# Altium footprint library FootPrintLib_1.PcbLib: 498 footprints (part 31 of 35)
Each footprint in its own frame and in the unit in brackets; x right, y up, seen from the top. Pads: shape width x height; smd on the part's side, far side on the other; paste and mask are expansions set on the pad; w line width, h text height; cw(c..) or ccw(c..) is an arc to the next point about the centre after c.
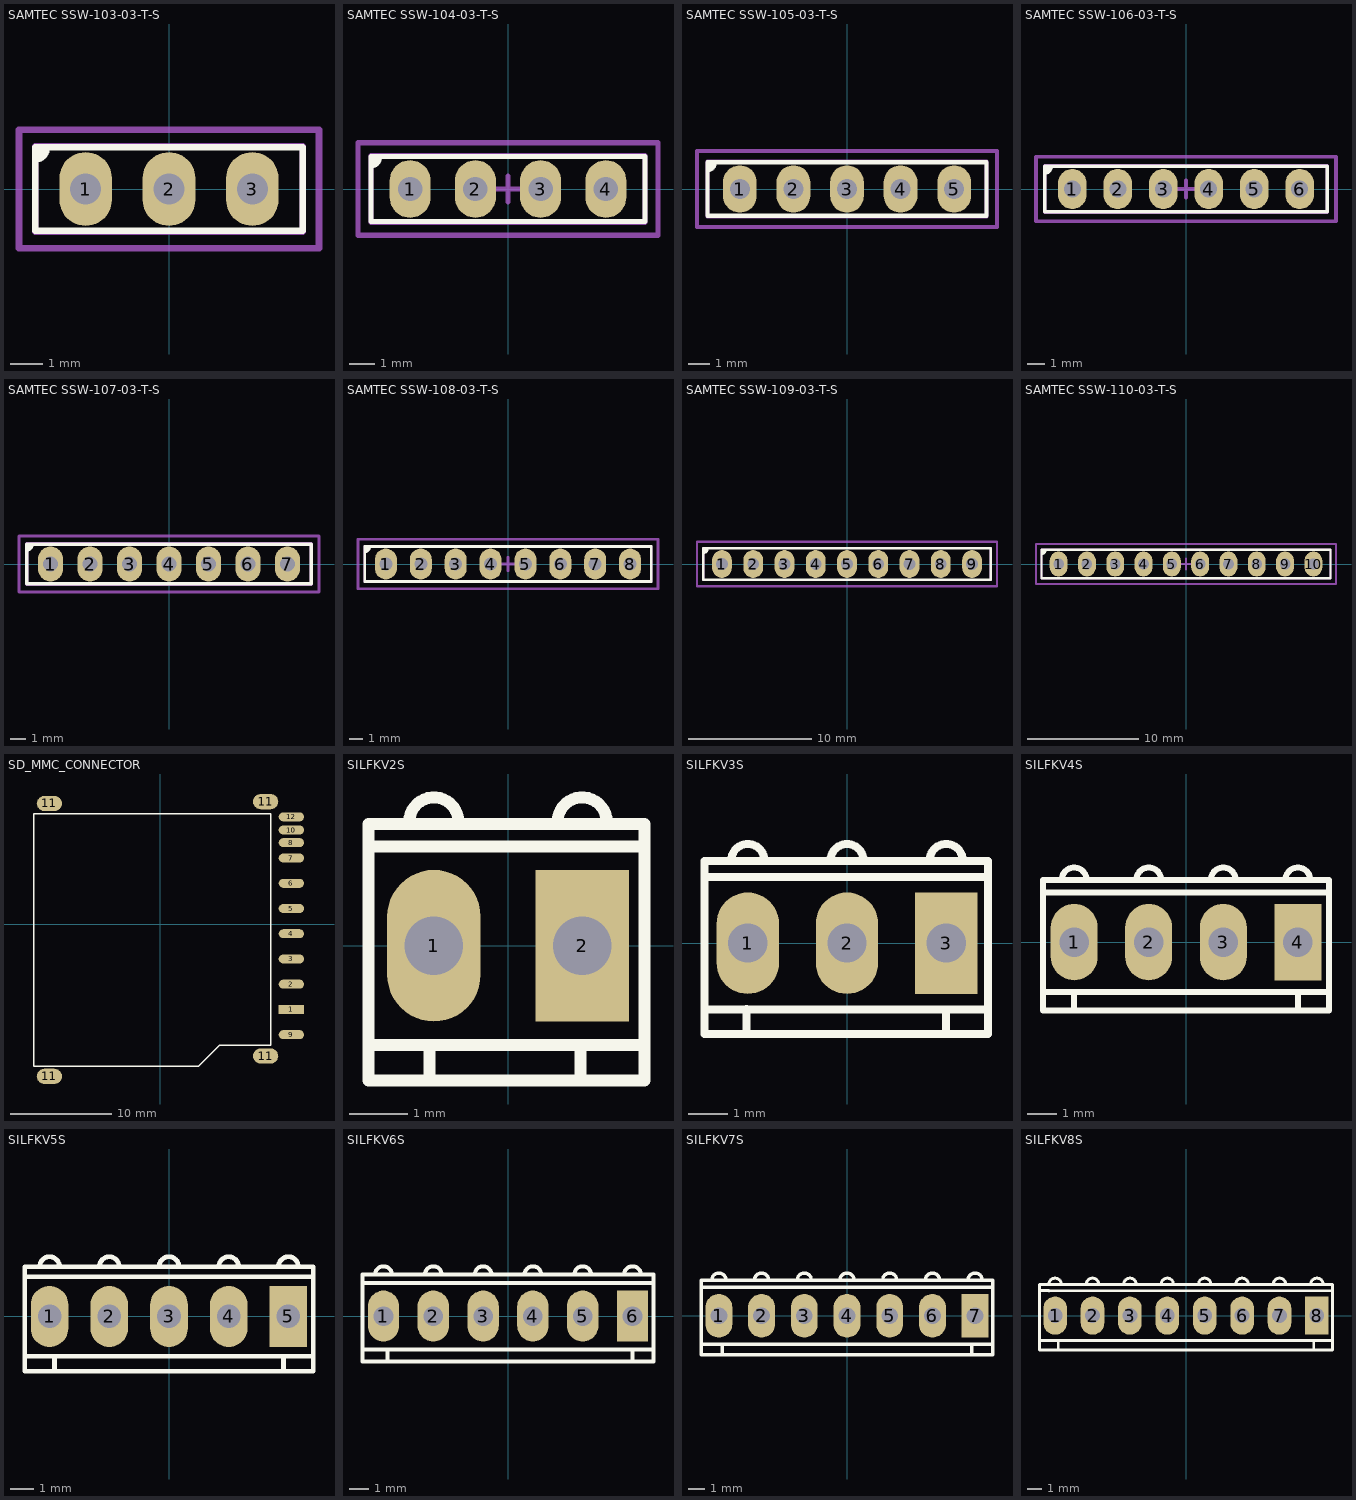
[diagram p30: the footprints below, top view; thin cyan lines are the x and y axes]

## SAMTEC SSW-103-03-T-S [mm]
height 8.51
pads (3):
  oval 1.6x2.25 hole 0.95: 1(-2.54,0) 2(0,0) 3(2.54,0)
Top Overlay:
  region: -4.07,1.27 -3.73,1.27 -3.73,1.1 -3.93,0.9 -4.07,0.9
  lines w0.2: -4.07,0.9 ccw(c-4.07,1.24) -3.73,1.24 -3.73,1.27 ; -4.07,-1.27 4.07,-1.27 4.07,1.27 -4.07,1.27 -4.07,-1.27
Mechanical 13:
  lines w0.2: -4.07,-1.3 -4.07,1.3 4.07,1.3 4.07,-1.3 -4.07,-1.3
Mechanical 15:
  lines w0.2: -0.5,0 0.5,0 ; 0,-0.5 0,0.5 ; -4.57,-1.8 4.57,-1.8 4.57,1.8 -4.57,1.8 -4.57,-1.8
3D body "Samtec-SSW-103-03-T-S.STEP": height 8.51, standoff -10.01, extent -4.064,-1.206 4.064,1.207

## SAMTEC SSW-104-03-T-S [mm]
height 8.51
pads (4):
  oval 1.6x2.25 hole 0.95: 1(-3.81,0) 2(-1.27,0) 3(1.27,0) 4(3.81,0)
Top Overlay:
  region: -5.34,1.27 -5,1.27 -5,1.1 -5.2,0.9 -5.34,0.9
  lines w0.2: -5.34,0.9 ccw(c-5.34,1.24) -5,1.24 -5,1.27 ; -5.34,-1.27 5.34,-1.27 5.34,1.27 -5.34,1.27 -5.34,-1.27
Mechanical 13:
  lines w0.2: -5.34,-1.3 -5.34,1.3 5.34,1.3 5.34,-1.3 -5.34,-1.3
Mechanical 15:
  lines w0.2: -0.5,0 0.5,0 ; 0,-0.5 0,0.5 ; -5.84,-1.8 5.84,-1.8 5.84,1.8 -5.84,1.8 -5.84,-1.8
3D body "Samtec-SSW-104-03-T-S.STEP": height 8.51, standoff -10.01, extent -5.334,-1.206 5.334,1.207

## SAMTEC SSW-105-03-T-S [mm]
height 8.51
pads (5):
  oval 1.6x2.25 hole 0.95: 1(-5.08,0) 2(-2.54,0) 3(0,0) 4(2.54,0) 5(5.08,0)
Top Overlay:
  region: -6.61,1.27 -6.27,1.27 -6.27,1.1 -6.47,0.9 -6.61,0.9
  lines w0.2: -6.61,0.9 ccw(c-6.61,1.24) -6.27,1.24 -6.27,1.27 ; -6.61,-1.27 -6.61,1.27 6.61,1.27 6.61,-1.27 -6.61,-1.27
Mechanical 13:
  lines w0.2: -6.61,-1.3 6.61,-1.3 6.61,1.3 -6.61,1.3 -6.61,-1.3
Mechanical 15:
  lines w0.2: -0.5,0 0.5,0 ; 0,-0.5 0,0.5 ; -7.11,-1.8 -7.11,1.8 7.11,1.8 7.11,-1.8 -7.11,-1.8
3D body "Samtec-SSW-105-03-T-S.STEP": height 8.51, standoff -10.01, extent -6.604,-1.206 6.604,1.207

## SAMTEC SSW-106-03-T-S [mm]
height 8.51
pads (6):
  oval 1.6x2.25 hole 0.95: 1(-6.35,0) 2(-3.81,0) 3(-1.27,0) 4(1.27,0) 5(3.81,0) 6(6.35,0)
Top Overlay:
  region: -7.88,1.27 -7.54,1.27 -7.54,1.1 -7.74,0.9 -7.88,0.9
  lines w0.2: -7.88,0.9 ccw(c-7.88,1.24) -7.54,1.24 -7.54,1.27 ; -7.88,-1.27 7.88,-1.27 7.88,1.27 -7.88,1.27 -7.88,-1.27
Mechanical 13:
  lines w0.2: -7.88,-1.3 -7.88,1.3 7.88,1.3 7.88,-1.3 -7.88,-1.3
Mechanical 15:
  lines w0.2: -0.5,0 0.5,0 ; 0,-0.5 0,0.5 ; -8.38,-1.8 8.38,-1.8 8.38,1.8 -8.38,1.8 -8.38,-1.8
3D body "Samtec-SSW-106-03-T-S.STEP": height 8.51, standoff -10.01, extent -7.874,-1.206 7.874,1.207

## SAMTEC SSW-107-03-T-S [mm]
height 8.51
pads (7):
  oval 1.6x2.25 hole 0.95: 1(-7.62,0) 2(-5.08,0) 3(-2.54,0) 4(0,0) 5(2.54,0) 6(5.08,0) 7(7.62,0)
Top Overlay:
  region: -9.15,1.27 -8.81,1.27 -8.81,1.1 -9.01,0.9 -9.15,0.9
  lines w0.2: -9.15,0.9 ccw(c-9.15,1.24) -8.81,1.24 -8.81,1.27 ; -9.15,-1.27 -9.15,1.27 9.15,1.27 9.15,-1.27 -9.15,-1.27
Mechanical 13:
  lines w0.2: -9.15,-1.3 9.15,-1.3 9.15,1.3 -9.15,1.3 -9.15,-1.3
Mechanical 15:
  lines w0.2: -0.5,0 0.5,0 ; 0,-0.5 0,0.5 ; -9.65,-1.8 -9.65,1.8 9.65,1.8 9.65,-1.8 -9.65,-1.8
3D body "Samtec-SSW-107-03-T-S.STEP": height 8.51, standoff -10.01, extent -9.144,-1.206 9.144,1.207

## SAMTEC SSW-108-03-T-S [mm]
height 8.51
pads (8):
  oval 1.6x2.25 hole 0.95: 1(-8.89,0) 2(-6.35,0) 3(-3.81,0) 4(-1.27,0) 5(1.27,0) 6(3.81,0) 7(6.35,0) 8(8.89,0)
Top Overlay:
  region: -10.42,1.27 -10.08,1.27 -10.08,1.1 -10.28,0.9 -10.42,0.9
  lines w0.2: -10.42,0.9 ccw(c-10.42,1.24) -10.08,1.24 -10.08,1.27 ; -10.42,-1.27 -10.42,1.27 10.42,1.27 10.42,-1.27 -10.42,-1.27
Mechanical 13:
  lines w0.2: -10.42,-1.3 10.42,-1.3 10.42,1.3 -10.42,1.3 -10.42,-1.3
Mechanical 15:
  lines w0.2: -0.5,0 0.5,0 ; 0,-0.5 0,0.5 ; -10.92,-1.8 -10.92,1.8 10.92,1.8 10.92,-1.8 -10.92,-1.8
3D body "Samtec-SSW-108-03-T-S.STEP": height 8.51, standoff -10.01, extent -10.414,-1.206 10.414,1.207

## SAMTEC SSW-109-03-T-S [mm]
height 8.51
pads (9):
  oval 1.6x2.25 hole 0.95: 1(-10.16,0) 2(-7.62,0) 3(-5.08,0) 4(-2.54,0) 5(0,0) 6(2.54,0) 7(5.08,0) 8(7.62,0) 9(10.16,0)
Top Overlay:
  region: -11.69,1.27 -11.35,1.27 -11.35,1.1 -11.55,0.9 -11.69,0.9
  lines w0.2: -11.69,0.9 ccw(c-11.69,1.24) -11.35,1.24 -11.35,1.27 ; -11.69,-1.27 11.69,-1.27 11.69,1.27 -11.69,1.27 -11.69,-1.27
Mechanical 13:
  lines w0.2: -11.69,-1.3 -11.69,1.3 11.69,1.3 11.69,-1.3 -11.69,-1.3
Mechanical 15:
  lines w0.2: -0.5,0 0.5,0 ; 0,-0.5 0,0.5 ; -12.19,-1.8 12.19,-1.8 12.19,1.8 -12.19,1.8 -12.19,-1.8
3D body "Samtec-SSW-109-03-T-S.STEP": height 8.51, standoff -10.01, extent -11.684,-1.206 11.684,1.207

## SAMTEC SSW-110-03-T-S [mm]
height 8.51
pads (10):
  oval 1.6x2.25 hole 0.95: 1(-11.43,0) 2(-8.89,0) 3(-6.35,0) 4(-3.81,0) 5(-1.27,0) 6(1.27,0) 7(3.81,0) 8(6.35,0) 9(8.89,0) 10(11.43,0)
Top Overlay:
  region: -12.96,1.27 -12.62,1.27 -12.62,1.1 -12.82,0.9 -12.96,0.9
  lines w0.2: -12.96,0.9 ccw(c-12.96,1.24) -12.62,1.24 -12.62,1.27 ; -12.96,-1.27 -12.96,1.27 12.96,1.27 12.96,-1.27 -12.96,-1.27
Mechanical 13:
  lines w0.2: -12.96,-1.3 12.96,-1.3 12.96,1.3 -12.96,1.3 -12.96,-1.3
Mechanical 15:
  lines w0.2: -0.5,0 0.5,0 ; 0,-0.5 0,0.5 ; -13.46,-1.8 -13.46,1.8 13.46,1.8 13.46,-1.8 -13.46,-1.8
3D body "Samtec-SSW-110-03-T-S.STEP": height 8.51, standoff -10.01, extent -12.954,-1.206 12.954,1.207

## SD_MMC_CONNECTOR [mil]
pads (15):
  rect 98.43x35 smd: 1(510,-330)
  oval 98.43x35 smd: 2(510,-232) 3(510,-134) 4(510,-36) 5(510,62) 6(510,160) 7(510,258) 8(510,318) 9(510,-428) 10(510,367) 12(510,418)
  oval 98.43x59.06 smd: 11(-430,-590) 11(-430,470) 11(410,-511.1) 11(410,477.09)
Top Overlay:
  lines w6: -390,-550 150,-550 230,-470 430,-470 ; -390,430 430,430 430,-470 ; -370,430 -490,430 -490,-550 -270,-550 ; 290,-470 430,-470

## SILFKV2S [mm]
pads (2):
  oval 1.6x2.6 hole 1: 1(-1.27,0)
  rect 1.6x2.6 hole 1: 2(1.27,0)
Top Overlay:
  lines w0.203: -2.388,-1.702 2.337,-1.702 ; -2.388,1.702 2.337,1.702 ; -1.693,2.117 cw(c-1.27,2.117) -0.847,2.117 ; -1.346,-2.311 -1.346,-1.702 ; 0.847,2.117 cw(c1.27,2.117) 1.693,2.117 ; 1.245,-2.286 1.245,-1.702 ; -2.388,-2.311 -2.388,2.083 2.337,2.083 2.337,-2.311 -2.388,-2.311

## SILFKV3S [mm]
pads (3):
  oval 1.6x2.6 hole 1: 1(-2.54,0) 2(0,0)
  rect 1.6x2.6 hole 1: 3(2.54,0)
Top Overlay:
  lines w0.203: -3.645,-2.325 3.605,-2.325 3.605,2.1 -3.645,2.1 -3.645,-2.32 ; -3.645,-1.7 3.605,-1.7 ; -3.63,1.7 -2.995,1.7 3.605,1.7 ; -2.963,2.117 cw(c-2.54,2.117) -2.117,2.117 ; -2.57,-2.325 -2.57,-1.69 ; -0.423,2.117 cw(c0,2.117) 0.423,2.117 ; 2.117,2.117 cw(c2.54,2.117) 2.963,2.117 ; 2.53,-2.325 2.53,-1.7

## SILFKV4S [mm]
pads (4):
  oval 1.6x2.6 hole 1: 1(-3.81,0) 2(-1.27,0) 3(1.27,0)
  rect 1.6x2.6 hole 1: 4(3.81,0)
Top Overlay:
  lines w0.203: -4.868,-1.693 4.868,-1.693 ; -4.868,1.693 -4.233,1.693 ; -4.233,2.117 cw(c-3.81,2.117) -3.387,2.117 ; -4.225,1.685 4.868,1.693 ; -3.81,-2.328 -3.81,-1.693 ; -1.693,2.117 cw(c-1.27,2.117) -0.847,2.117 ; 0.847,2.117 cw(c1.27,2.117) 1.693,2.117 ; 3.387,2.117 cw(c3.81,2.117) 4.233,2.117 ; 3.81,-2.328 3.81,-1.693 ; -4.868,-2.328 4.868,-2.328 4.868,2.117 -4.868,2.117 -4.868,-2.328

## SILFKV5S [mm]
pads (5):
  oval 1.6x2.6 hole 1: 1(-5.08,0) 2(-2.54,0) 3(0,0) 4(2.54,0)
  rect 1.6x2.6 hole 1: 5(5.08,0)
Top Overlay:
  lines w0.203: -6.138,-1.693 6.138,-1.693 ; -6.138,1.693 -5.503,1.693 ; -6.13,1.693 6.138,1.693 ; -5.503,2.117 cw(c-5.08,2.117) -4.657,2.117 ; -4.868,-2.328 -4.868,-1.693 ; -2.963,2.117 cw(c-2.54,2.117) -2.117,2.117 ; -0.423,2.117 cw(c0,2.117) 0.423,2.117 ; 2.117,2.117 cw(c2.54,2.117) 2.963,2.117 ; 4.657,2.117 cw(c5.08,2.117) 5.503,2.117 ; 4.868,-2.328 4.868,-1.693 ; -6.138,-2.328 6.138,-2.328 6.138,2.117 -6.138,2.117 -6.138,-2.328

## SILFKV6S [mm]
pads (6):
  oval 1.6x2.6 hole 1: 1(-6.35,0) 2(-3.81,0) 3(-1.27,0) 4(1.27,0) 5(3.81,0)
  rect 1.6x2.6 hole 1: 6(6.35,0)
Top Overlay:
  lines w0.203: -7.408,-1.693 7.408,-1.693 ; -7.408,1.693 -6.773,1.693 ; -6.773,2.117 cw(c-6.35,2.117) -5.927,2.117 ; -6.765,1.685 7.408,1.693 ; -6.138,-2.328 -6.138,-1.693 ; -4.233,2.117 cw(c-3.81,2.117) -3.387,2.117 ; -1.693,2.117 cw(c-1.27,2.117) -0.847,2.117 ; 0.847,2.117 cw(c1.27,2.117) 1.693,2.117 ; 3.387,2.117 cw(c3.81,2.117) 4.233,2.117 ; 5.927,2.117 cw(c6.35,2.117) 6.773,2.117 ; 6.35,-2.328 6.35,-1.693 ; -7.408,-2.328 -7.408,2.117 7.408,2.117 7.408,-2.328 -7.408,-2.328

## SILFKV7S [mm]
pads (7):
  oval 1.6x2.6 hole 1: 1(-7.62,0) 2(-5.08,0) 3(-2.54,0) 4(0,0) 5(2.54,0) 6(5.08,0)
  rect 1.6x2.6 hole 1: 7(7.62,0)
Top Overlay:
  lines w0.203: -8.678,-1.693 8.678,-1.693 ; -8.678,1.693 -8.043,1.693 ; -8.043,2.117 cw(c-7.62,2.117) -7.197,2.117 ; -8.035,1.685 8.678,1.693 ; -7.408,-2.328 -7.408,-1.693 ; -5.503,2.117 cw(c-5.08,2.117) -4.657,2.117 ; -2.963,2.117 cw(c-2.54,2.117) -2.117,2.117 ; -0.423,2.117 cw(c0,2.117) 0.423,2.117 ; 2.117,2.117 cw(c2.54,2.117) 2.963,2.117 ; 4.657,2.117 cw(c5.08,2.117) 5.503,2.117 ; 7.197,2.117 cw(c7.62,2.117) 8.043,2.117 ; 7.408,-2.328 7.408,-1.693 ; -8.678,-2.328 -8.678,2.117 8.678,2.117 8.678,-2.328 -8.678,-2.328

## SILFKV8S [mm]
pads (8):
  oval 1.6x2.6 hole 1: 1(-8.89,0) 2(-6.35,0) 3(-3.81,0) 4(-1.27,0) 5(1.27,0) 6(3.81,0) 7(6.35,0)
  rect 1.6x2.6 hole 1: 8(8.89,0)
Top Overlay:
  lines w0.203: -9.948,-1.693 9.948,-1.693 ; -9.948,1.693 -9.313,1.693 ; -9.313,2.117 cw(c-8.89,2.117) -8.467,2.117 ; -9.305,1.685 9.948,1.693 ; -8.678,-2.328 -8.678,-1.693 ; -6.773,2.117 cw(c-6.35,2.117) -5.927,2.117 ; -4.233,2.117 cw(c-3.81,2.117) -3.387,2.117 ; -1.693,2.117 cw(c-1.27,2.117) -0.847,2.117 ; 0.847,2.117 cw(c1.27,2.117) 1.693,2.117 ; 3.387,2.117 cw(c3.81,2.117) 4.233,2.117 ; 5.927,2.117 cw(c6.35,2.117) 6.773,2.117 ; 8.467,2.117 cw(c8.89,2.117) 9.313,2.117 ; 8.678,-2.328 8.678,-1.693 ; -9.948,-2.328 9.948,-2.328 9.948,2.117 -9.948,2.117 -9.948,-2.328